# Altium integrated library ESD122U1W0201E6327XTSA1.IntLib: 1 symbol
Pins are listed as number, name and electrical type; pins without a type are passive.

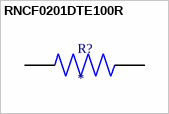
[diagram p0: symbol RNCF0201DTE100R]

## RNCF0201DTE100R
designator R?
MP: RNCF0201DTE100R; Package: None; Price: None; Value: *; Availability: Unavailable
footprint RESC0502X28N
pins: 1, 2